# Altium footprint library PcbLib1.PcbLib: 10 footprints
Each footprint in its own frame and in the unit in brackets; x right, y up, seen from the top. Pads: shape width x height; smd on the part's side, far side on the other; paste and mask are expansions set on the pad; w line width, h text height; cw(c..) or ccw(c..) is an arc to the next point about the centre after c.
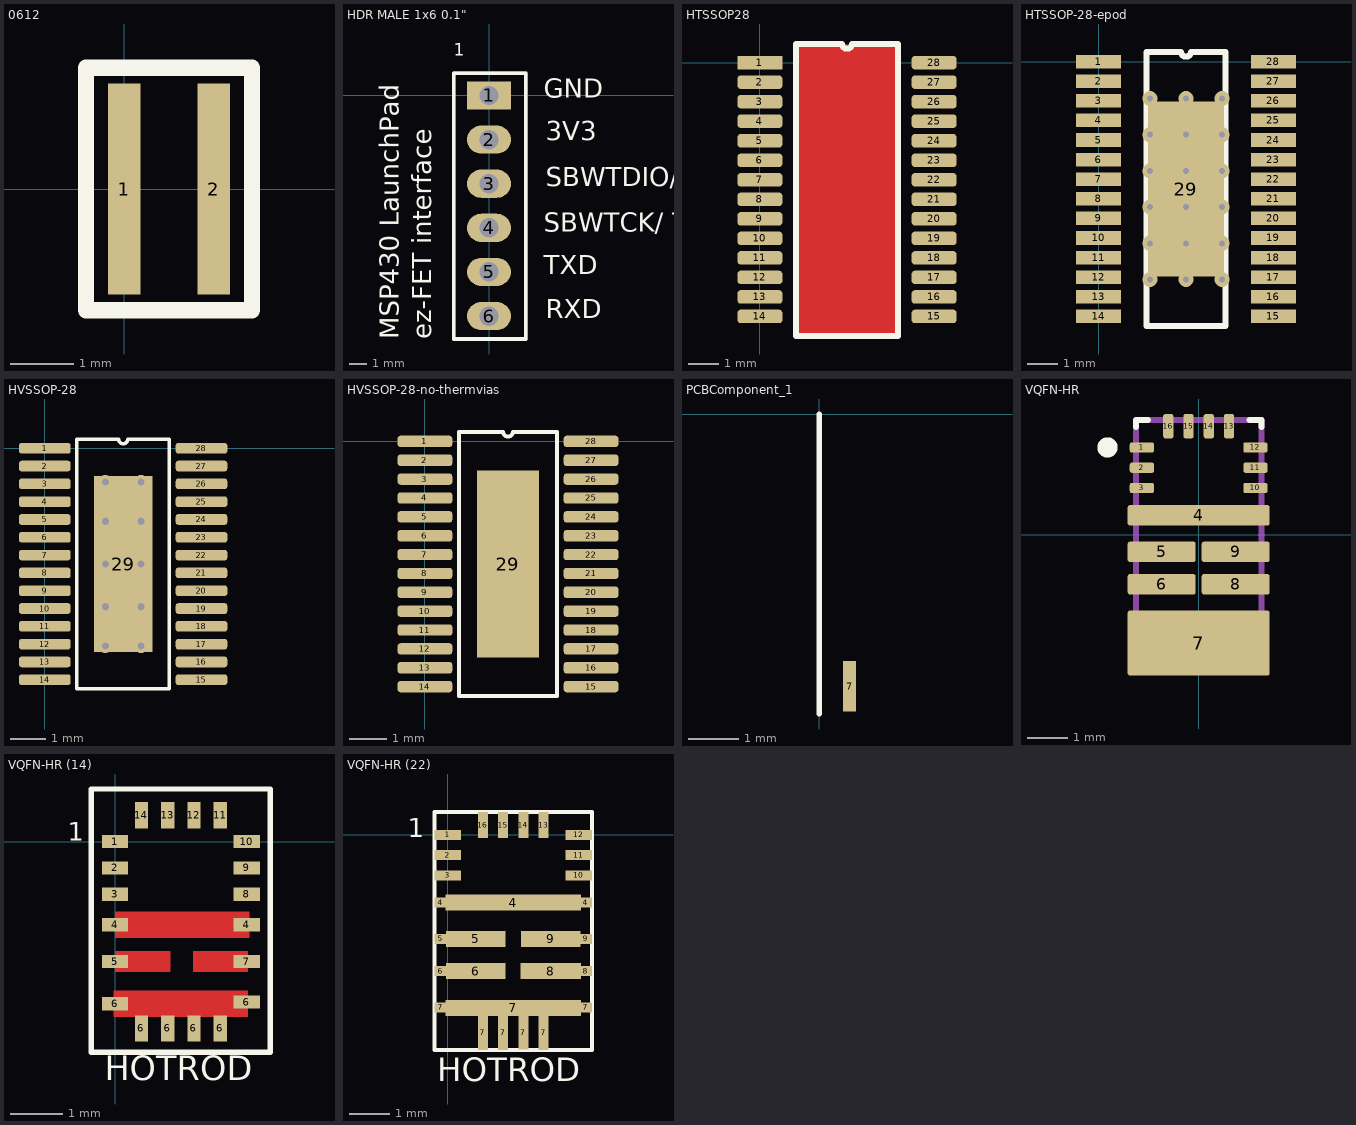
[diagram p0: the footprints below, top view; thin cyan lines are the x and y axes]

## 0612 [mil]
pads (2):
  rect 20x130 smd: 1(0,0) 2(55.12,0)
Top Overlay:
  lines w10: -23.62,-74.8 -23.62,-6.18 -23.62,74.8 78.74,74.8 78.74,-74.8 -23.62,-74.8

## HDR MALE 1x6 0.1" [mm] "WURTH HEADER MALE 1x6"
pads (6):
  rect 2.5x1.6 hole 1.1: 1(0,0)
  oval 2.5x1.6 hole 1.1: 2(0,-2.5) 3(0,-5) 4(0,-7.5) 5(0,-10) 6(0,-12.5)
Top Overlay:
  lines w0.2: -2,-13.8 2.085,-13.8 2.085,1.25 -2,1.25 -2,-13.8
  text "MSP430 LaunchPad / ez-FET interface" at -2.9,-13.8 h1.85
  text "1" at -2,2 h1.2
  text "GND" at 3.1,-0.5 h1.85
  text "3V3" at 3.2,-2.9 h1.85
  text "SBWTDIO/ RST" at 3.2,-5.5 h1.85
  text "SBWTCK/ TEST" at 3.1,-8.1 h1.85
  text "TXD" at 3.1,-10.5 h1.85
  text "RXD" at 3.2,-13 h1.85
Mechanical 29:
  lines w0.2: -2,-13.8 2.1,-13.8 2.1,1.3 -2,1.3 -2,-13.8
  text "1" at -2,2 h1.2

## HTSSOP28 [mm] "HTSSOP28"
pads (28):
  rect 1.5x0.45 smd: 1(0,0)
  rrect50% 1.5x0.45 smd: 2(0,-0.65) 3(0,-1.3) 4(0,-1.95) 5(0,-2.6) 6(0,-3.25) 7(0,-3.9) 8(0,-4.55) 9(0,-5.2) 10(0,-5.85) 11(0,-6.5) 12(0,-7.15) 13(0,-7.8) 14(0,-8.45) 15(5.8,-8.45) 16(5.8,-7.8) 17(5.8,-7.15) 18(5.8,-6.5) 19(5.8,-5.85) 20(5.8,-5.2) 21(5.8,-4.55) 22(5.8,-3.9) 23(5.8,-3.25) 24(5.8,-2.6) 25(5.8,-1.95) 26(5.8,-1.3) 27(5.8,-0.65) 28(5.8,0)
Top Layer:
  rectangle: 1.2,-9.1 4.6,0.6
Top Overlay:
  lines w0.2: 1.2,0.6 1.2,-9.1 4.6,-9.1 4.6,0.6 ; 1.2,0.625 2.738,0.625 ccw(c2.9,0.625) 3.062,0.625 4.6,0.625

## HTSSOP-28-epod [mm]
pads (29):
  rect 1.5x0.45 smd: 1(0,0) 2(0,-0.65) 3(0,-1.3) 4(0,-1.95) 5(0,-2.6) 6(0,-3.25) 7(0,-3.9) 8(0,-4.55) 9(0,-5.2) 10(0,-5.85) 11(0,-6.5) 12(0,-7.15) 13(0,-7.8) 14(0,-8.45) 15(5.8,-8.45) 16(5.8,-7.8) 17(5.8,-7.15) 18(5.8,-6.5) 19(5.8,-5.85) 20(5.8,-5.2) 21(5.8,-4.55) 22(5.8,-3.9) 23(5.8,-3.25) 24(5.8,-2.6) 25(5.8,-1.95) 26(5.8,-1.3) 27(5.8,-0.65) 28(5.8,0)
  rect 2.53x5.8 smd: 29(2.9,-4.225)
via 4.1,-7.225 diameter 0.5 hole 0.2
via 2.9,-7.225 diameter 0.5 hole 0.2
via 1.7,-7.225 diameter 0.5 hole 0.2
via 4.1,-2.425 diameter 0.5 hole 0.2
via 2.9,-2.425 diameter 0.5 hole 0.2
via 1.7,-2.425 diameter 0.5 hole 0.2
via 1.7,-4.825 diameter 0.5 hole 0.2
via 2.9,-4.825 diameter 0.5 hole 0.2
via 4.1,-4.825 diameter 0.5 hole 0.2
via 4.1,-6.025 diameter 0.5 hole 0.2
via 2.9,-6.025 diameter 0.5 hole 0.2
via 1.7,-6.025 diameter 0.5 hole 0.2
via 1.7,-1.225 diameter 0.5 hole 0.2
via 2.9,-1.225 diameter 0.5 hole 0.2
via 4.1,-1.225 diameter 0.5 hole 0.2
via 4.1,-3.625 diameter 0.5 hole 0.2
via 1.7,-3.625 diameter 0.5 hole 0.2
via 2.9,-3.625 diameter 0.5 hole 0.2
Top Overlay:
  lines w0.2: 1.585,-8.775 1.585,0.325 2.738,0.325 ccw(c2.9,0.325) 3.062,0.325 4.215,0.325 4.215,-8.775 1.585,-8.775

## HVSSOP-28 [mm]
pads (29):
  rrect50% 1.45x0.3 smd: 1(0,0) 2(0,-0.5) 3(0,-1) 4(0,-1.5) 5(0,-2) 6(0,-2.5) 7(0,-3) 8(0,-3.5) 9(0,-4) 10(0,-4.5) 11(0,-5) 12(0,-5.5) 13(0,-6) 14(0,-6.5) 15(4.4,-6.5) 16(4.4,-6) 17(4.4,-5.5) 18(4.4,-5) 19(4.4,-4.5) 20(4.4,-4) 21(4.4,-3.5) 22(4.4,-3) 23(4.4,-2.5) 24(4.4,-2) 25(4.4,-1.5) 26(4.4,-1) 27(4.4,-0.5) 28(4.4,0)
  rect 1.65x4.95 smd mask+0.2: 29(2.2,-3.25)
via 2.7,-4.45 diameter 0.4 hole 0.2
via 1.7,-4.45 diameter 0.4 hole 0.2
via 2.7,-2.05 diameter 0.4 hole 0.2
via 1.7,-2.05 diameter 0.4 hole 0.2
via 2.7,-3.25 diameter 0.4 hole 0.2
via 1.7,-3.25 diameter 0.4 hole 0.2
via 2.7,-5.55 diameter 0.4 hole 0.2
via 1.7,-5.55 diameter 0.4 hole 0.2
via 2.7,-0.95 diameter 0.4 hole 0.2
via 1.7,-0.95 diameter 0.4 hole 0.2
Top Layer:
  region: 7.7,-1.05
Top Overlay:
  lines w0.1: 0.9,-6.75 3.5,-6.75 3.5,0.25 2.325,0.25 cw(c2.2,0.25) 2.075,0.25 0.9,0.25 0.9,-6.75

## HVSSOP-28-no-thermvias [mm] "HVSSOP-28 without thermal vias"
pads (29):
  rrect50% 1.45x0.3 smd: 1(0,0) 2(0,-0.5) 3(0,-1) 4(0,-1.5) 5(0,-2) 6(0,-2.5) 7(0,-3) 8(0,-3.5) 9(0,-4) 10(0,-4.5) 11(0,-5) 12(0,-5.5) 13(0,-6) 14(0,-6.5) 15(4.4,-6.5) 16(4.4,-6) 17(4.4,-5.5) 18(4.4,-5) 19(4.4,-4.5) 20(4.4,-4) 21(4.4,-3.5) 22(4.4,-3) 23(4.4,-2.5) 24(4.4,-2) 25(4.4,-1.5) 26(4.4,-1) 27(4.4,-0.5) 28(4.4,0)
  rect 1.65x4.95 smd mask+0.2: 29(2.2,-3.25)
Top Overlay:
  lines w0.1: 0.9,-6.75 3.5,-6.75 3.5,0.25 2.325,0.25 cw(c2.2,0.25) 2.075,0.25 0.9,0.25 0.9,-6.75

## PCBComponent_1 [mm]
pads (1):
  rect 0.25x1 smd: 7(0.6,-5.4)
Top Overlay:
  lines w0.1: 0,-5.95 0,0

## VQFN-HR [mm] "DRV8x44"
pads (16):
  rrect40% 0.6x0.25 smd paste+0 mask+0: 1(-1.4,2.15) 2(-1.4,1.65) 3(-1.4,1.15) 10(1.4,1.15) 11(1.4,1.65) 12(1.4,2.15)
  rrect20% 3.5x0.5 smd paste-1000 mask-1000: 4(0,0.475)
  rrect20% 1.675x0.5 smd paste-1000 mask-1000: 5(-0.913,-0.425) 6(-0.913,-1.225) 8(0.913,-1.225) 9(0.913,-0.425)
  rrect6% 3.5x1.6 smd paste-1000 mask-1000: 7(0,-2.675)
  rrect40% 0.25x0.6 smd paste+0 mask+0: 13(0.75,2.675) 14(0.25,2.675) 15(-0.25,2.675) 16(-0.75,2.675)
Top Overlay:
  circle w0.25: c-2.25,2.15 r0.125
  lines w0.15: -1.55,2.65 -1.55,2.825 -1.25,2.825 ; 1.25,2.825 1.55,2.825 1.55,2.65
Top Paste:
  drawing of 12 lines, arcs and shapes, not listed
Top Solder:
  drawing of 6 lines, arcs and shapes, not listed
M5 Assembly Top:
  lines w0.15: -1.55,-3.275 1.55,-3.275 1.55,2.825 -1.55,2.825 -1.55,-3.275
  text ".Designator" at 0.21,-2.63 h0.5
3D body "IC_DRV8244_VQFN_HR_VQFN-HR16.STEP": height 0.25, standoff 0, extent -1.85,-3.575 1.851,3.075

## VQFN-HR (14) [mm]
pads (20):
  rect 0.5x0.25 smd: 1(0,0) 2(0,-0.5) 3(0,-1) 4(0,-1.58) 4(2.5,-1.58) 5(0,-2.28) 6(0,-3.08) 6(2.5,-3.05) 7(2.5,-2.28) 8(2.5,-1) 9(2.5,-0.5) 10(2.5,0)
  rect 0.25x0.5 smd: 6(0.5,-3.55) 6(1,-3.55) 6(1.5,-3.55) 6(2,-3.55) 11(2,0.5) 12(1.5,0.5) 13(1,0.5) 14(0.5,0.5)
Top Layer:
  rectangle: -0.025,-3.33 2.525,-2.83
  rectangle: 0,-2.48 1.05,-2.08
  rectangle: 0,-1.83 2.55,-1.33
  rectangle: 1.48,-2.48 2.53,-2.08
Top Overlay:
  lines w0.1: -0.45,-4 -0.45,1 2.95,1 2.95,-4 -0.45,-4
  text "1" at -0.9,-0.1 h0.6
  text "HOTROD" at -0.2,-4.7 h0.8
Mechanical 29:
  text "'.Designator'" at 1.65,-3.925 h1.85

## VQFN-HR (22) [mm]
pads (28):
  rect 0.65x0.25 smd: 1(0,0) 2(0,-0.5) 3(0,-1) 10(3.25,-1) 11(3.25,-0.5) 12(3.25,0)
  rect 0.3x0.25 smd: 4(-0.175,-1.675) 4(3.425,-1.675) 5(-0.175,-2.575) 6(-0.175,-3.375) 7(-0.175,-4.275) 7(3.425,-4.275) 8(3.425,-3.375) 9(3.425,-2.575)
  rect 3.35x0.4 smd: 4(1.625,-1.675) 7(1.625,-4.285)
  rect 1.475x0.4 smd: 5(0.695,-2.575) 6(0.695,-3.375) 9(2.555,-2.575)
  rect 0.25x0.85 smd: 7(0.875,-4.9) 7(1.375,-4.9) 7(1.875,-4.895) 7(2.375,-4.9)
  rect 1.49x0.4 smd: 8(2.555,-3.375)
  rect 0.25x0.65 smd: 13(2.375,0.245) 14(1.875,0.245) 15(1.375,0.245) 16(0.875,0.245)
Top Layer:
  pour cut-out: 3.985,1.14
Top Overlay:
  lines w0.1: -0.325,-5.325 -0.325,0.575 3.575,0.575 3.575,-5.325 -0.325,-5.325
  text "1" at -0.995,-0.215 h0.8
  text "HOTROD" at -0.255,-6.295 h1
Mechanical 29:
  text "'.Designator'" at 2.045,-5.035 h1.85